# Altium footprint library MP6519GQ-Z.PcbLib: 1 footprints
Each footprint in its own frame and in the unit in brackets; x right, y up, seen from the top. Pads: shape width x height; smd on the part's side, far side on the other; paste and mask are expansions set on the pad; w line width, h text height; cw(c..) or ccw(c..) is an arc to the next point about the centre after c.
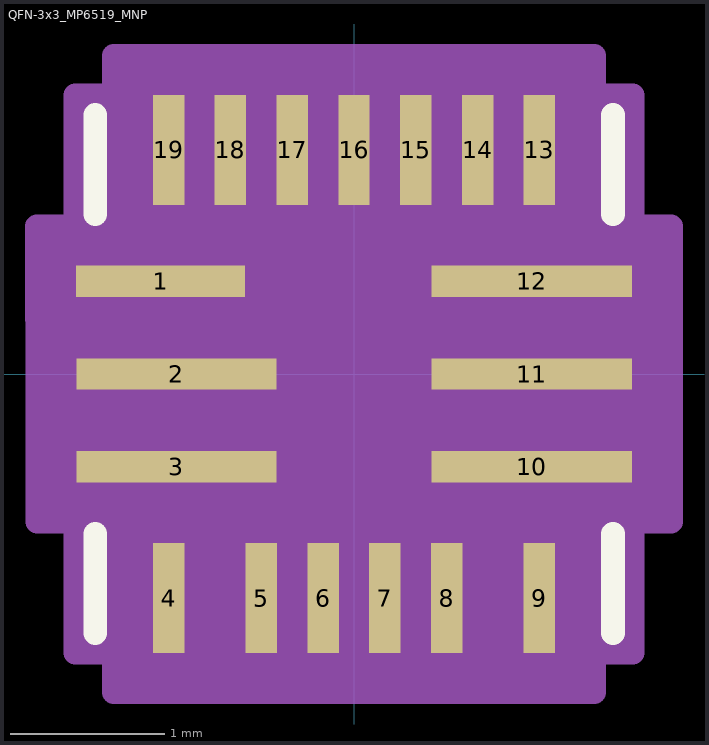
[diagram p0: the footprint, top view; thin cyan lines are the x and y axes]

## QFN-3x3_MP6519_MNP [mil]
pads (19):
  rect 43x8 smd paste+0 mask+0: 1(-49.29,23.62)
  rect 51x8 smd paste+0 mask+0: 2(-45.28,0) 3(-45.28,-23.62) 10(45.28,-23.62) 11(45.28,0) 12(45.28,23.62)
  rect 8x28 smd paste+0 mask+0: 4(-47.24,-57.09) 5(-23.62,-57.09) 6(-7.87,-57.09) 7(7.87,-57.09) 8(23.62,-57.09) 9(47.24,-57.09) 13(47.24,57.09) 14(31.5,57.09) 15(15.75,57.09) 16(0,57.09) 17(-15.75,57.09) 18(-31.5,57.09) 19(-47.24,57.09)
Top Overlay:
  lines w6: -66,-66 -66,-40.72 ; -66,40.72 -66,66 ; 66,-66 66,-40.72 ; 66,40.72 66,66
Mechanical 13:
  lines w1: -61,11 -11,61 ; -61,-61 -61,61 61,61 61,-61 -61,-61
Mechanical 15:
  region: -61.24,-81.09 61.24,-81.09 61.24,-71 71,-71 71,-37.62 80.78,-37.62 80.78,37.62 71,37.62 71,71 61.24,71 61.24,81.09 -61.24,81.09 -61.24,71 -71,71 -71,37.62 -80.79,37.62 -80.79,14 -80.78,14 -80.78,-37.62 -71,-37.62 -71,-71 -61.24,-71
  lines w6: -80.78,14 -80.78,-37.62 -71,-37.62 -71,-71 -61.24,-71 -61.24,-81.09 61.24,-81.09 61.24,-71 71,-71 71,-37.62 80.78,-37.62 80.78,37.62 71,37.62 71,71 61.24,71 61.24,81.09 -61.24,81.09 -61.24,71 -71,71 -71,37.62 -80.79,37.62 -80.79,14 ; -80.79,14 -80.78,14